# Altium schematic symbol library semubot_lidar_driver_schematics.SchLib: 23 symbols
Pins are listed as number, name and electrical type; pins without a type are passive.

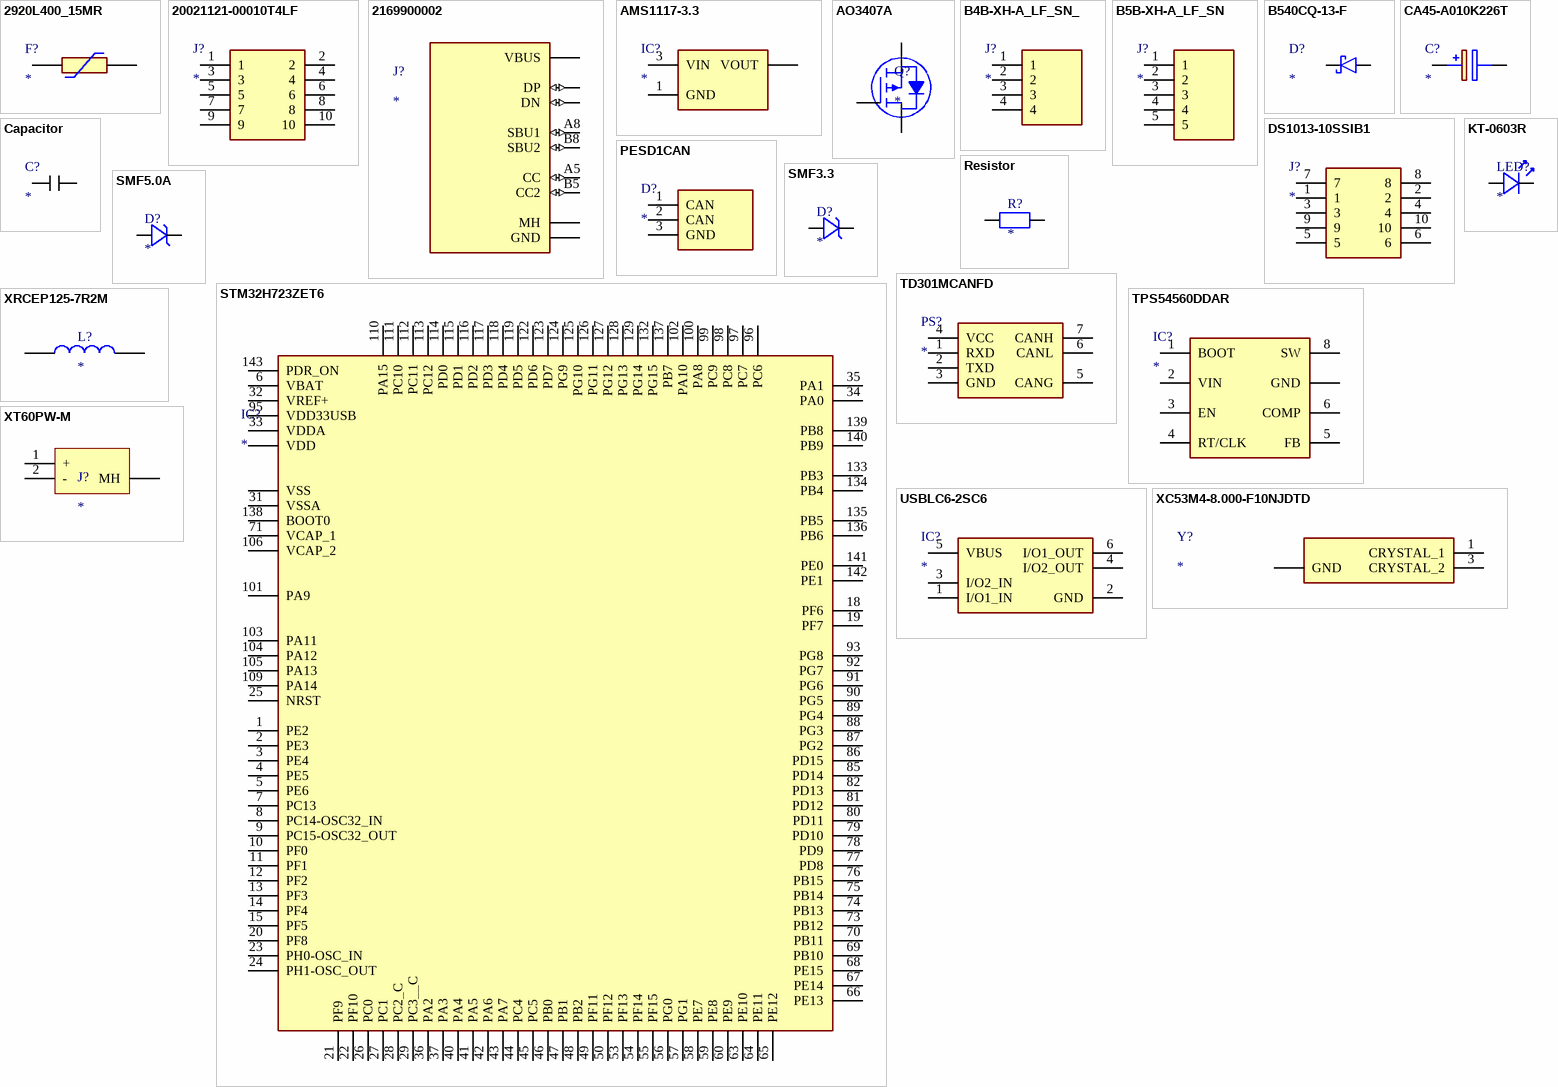
[diagram p0: symbols 2920L400_15MR to XT60PW-M]

## 2920L400_15MR
designator F?
Resettable Fuse; Manufacturer_Name: LITTELFUSE; Manufacturer_Part_Number: 2920L400/15MR; Datasheet Link: http://m.littelfuse.com/~/media/electronics/datasheets/resettable_ptcs/littelfuse_ptc_2920l_datasheet.pdf.pdf; Height: 1.8mm; Mouser Part Number: 576-2920L400/15MR; Mouser Price/Stock: https://www.mouser.co.uk/ProductDetail/Littelfuse/2920L400-15MR?qs=%2FPOkb%252BiDxRVcBFTgv8H%2FIw%3D%3D; Arrow Part Number: 2920L400/15MR; Arrow Price/Stock: https://www.arrow.com/en/products/2920l40015mr/littelfuse?utm_currency=USD&region=nac
footprint 2920L07560MR
pins: 1, 2

## 20021121-00010T4LF
designator J?
Connector; Manufacturer_Name: Amphenol; Manufacturer_Part_Number: 20021121-00010T4LF; Datasheet Link: https://cdn.amphenol-cs.com/media/wysiwyg/files/drawing/20021121.pdf; Height: 4.75mm; Mouser Part Number: 649-221121-00010T4LF; Mouser Price/Stock: https://www.mouser.co.uk/ProductDetail/Amphenol-FCI/20021121-00010T4LF?qs=oJs1R%252BxK6kTva5Su0CuB6g%3D%3D; Supplier 1: Avnet; Supplier Part Number 1: 20021121-00010T4LF; ComponentLink1Description: Datasheet; ComponentLink1URL: https://cdn.amphenol-cs.com/media/wysiwyg/files/drawing/20021121.pdf
footprint 2002112100010T4LF
pins: 1, 2, 3, 4, 5, 6, 7, 8, 9, 10

## 2169900002
designator J?
Connector; Manufacturer_Name: Molex; Manufacturer_Part_Number: 2169900002; Datasheet Link: https://www.molex.com/en-us/products/part-detail-pdf/2169900002?display=pdf; Height: 3.36mm; Arrow Part Number: 2169900002; Arrow Price/Stock: https://www.arrow.com/en/products/2169900002/molex.html?utm_currency=USD&region=nac
footprint 2169900002; pin to pad A1>A1+A12 A4>A4+A9 A6>A6+B6 A7>A7+B7 MH1>MH1+MH2+MH3+MH4
pins: A1 GND, A4 VBUS, A5 CC (io), A6 DP (io), A7 DN (io), A8 SBU1 (io), B5 CC2 (io), B8 SBU2 (io), MH1 MH

## AMS1117-3.3
designator IC?
Integrated Circuit; Manufacturer_Name: Advanced Monolithic Systems; Manufacturer_Part_Number: AMS1117-1.5; Datasheet Link: http://www.advanced-monolithic.com/pdf/ds1117.pdf; Height: 1.8mm
footprint AMS1117-3.3 (C6186)
pins: 1 GND, 3 VIN, 4 VOUT

## AO3407A
designator Q?
MOSFET (P-Channel); Manufacturer_Name: Alpha & Omega Semiconductors; Manufacturer_Part_Number: AO3407A; Height: 1.25mm; Arrow Part Number: AO3401A; Arrow Price/Stock: https://www.arrow.com/en/products/ao3401a/alpha-and-omega-semiconductor.html?utm_currency=USD&region=nac
footprint SOT95P280X125-3N
pins: 1, 2, 3

## B4B-XH-A_LF_SN_
designator J?
Connector; Manufacturer_Name: JST (JAPAN SOLDERLESS TERMINALS); Manufacturer_Part_Number: B4B-XH-A(LF)(SN); Datasheet Link: https://datasheet.lcsc.com/szlcsc/JST-Sales-America-B4B-XH-A-LF-SN_C144395.pdf; Height: 7mm; Mouser Part Number: 306-B4BXHALFSN; Mouser Price/Stock: https://www.mouser.co.uk/ProductDetail/JST-Commercial/B4B-XH-ALFSN?qs=cdbOS8ANM9CfC08d%252BywhFw%3D%3D; Arrow Part Number: B4B-XH-A(LF)(SN); Arrow Price/Stock: https://www.arrow.com/en/products/b4b-xh-a-lf-sn/jst-manufacturing.html?utm_currency=USD&region=europe
footprint B4BXHALFSN
pins: 1, 2, 3, 4

## B5B-XH-A_LF_SN
designator J?
Connector; Manufacturer_Name: JST (JAPAN SOLDERLESS TERMINALS); Manufacturer_Part_Number: B5B-XH-A(LF)(SN); Datasheet Link: http://www.jst-mfg.com/product/pdf/eng/eXH.pdf; Height: 7mm; Mouser Part Number: N/A; Mouser Price/Stock: https://www.mouser.co.uk/ProductDetail/JST-Commercial/B5B-XH-ALFSN?qs=IKkN%2F947nfBtEhlRye3uAw%3D%3D; Arrow Part Number: B5B-XH-A(LF)(SN); Arrow Price/Stock: https://www.arrow.com/en/products/b5b-xh-a-lf-sn/jst-manufacturing.html?utm_currency=USD&region=europe
footprint B5B-XH-A(LF)(SN)
pins: 1, 2, 3, 4, 5

## B540CQ-13-F
designator D?
Schottky Diode; Manufacturer_Name: Diodes Incorporated; Manufacturer_Part_Number: B540CQ-13-F; Datasheet Link: https://www.diodes.com/assets/Datasheets/ds13012.pdf; Height: 2.5mm; Mouser Part Number: 621-B540CQ-13-F; Mouser Price/Stock: https://www.mouser.co.uk/ProductDetail/Diodes-Incorporated/B540CQ-13-F?qs=BvpHGKeVh3rbtYAYW%2FUwCw%3D%3D; Arrow Part Number: B540CQ-13-F; Arrow Price/Stock: https://www.arrow.com/en/products/b540cq-13-f/diodes-incorporated?utm_currency=USD&region=europe
footprint B540CQ-13-F
pins: 1 K, 2 A

## CA45-A010K226T
designator C?
Capacitor Polarised C122643; Manufacturer_Name: Hunan Xiangyee in S&T; Manufacturer_Part_Number: CA45-A010K226T; Datasheet Link: https://datasheet.lcsc.com/szlcsc/1811261831_Hunan-Xiangyee-in-S-T-CA45-A010K226T_C122643.pdf; Height: 1.8mm
footprint CAPPM3216X180N
pins: 1 +, 2 -

## Capacitor
designator C?
Capacitor; Capacitance: *
footprint 0603Capacitor
footprint 0805Capacitor
footprint 1206CAPACITOR
pins: 1, 2

## DS1013-10SSIB1
designator J?
Connector; Manufacturer_Name: Connfly; Manufacturer_Part_Number: DS1013-10SSIB1; Datasheet Link: https://www.tme.com/Document/27ec11f62a6bc702dcb7110a541f177d/DS1013.pdf; Height: 9.55mm
footprint DS101310SSIB1
pins: 1, 2, 3, 4, 5, 6, 7, 8, 9, 10

## KT-0603R
designator LED?
LED; Manufacturer_Name: Hubei KENTO Elec; Manufacturer_Part_Number: KT-0603R; Datasheet Link: https://datasheet.lcsc.com/szlcsc/Hubei-KENTO-Elec-KT-0603R_C2286.pdf; Height: 0.7mm
footprint LEDC1608X70N
pins: 1, 2

## PESD1CAN
designator D?
TVS Diode (Bi-directional); Manufacturer_Name: NXP; Manufacturer_Part_Number: PESD1CAN; Datasheet Link: https://datasheet.preprod.pas.partquest.com/images/VipMasterIC/IC/PHGL/PHGLS15341/PHGLS15341-1.pdf?hkey=61A2E4C270F0397D049F8F05BD4F1054; Height: 1.1mm; Mouser Part Number: N/A; Mouser Price/Stock: https://www.mouser.co.uk/ProductDetail/NXP-Semiconductors/PESD1CAN?qs=55YtniHzbhBnD7lYYuVpRQ%3D%3D
footprint SOT95P230X110-3N
pins: 1 CAN, 2 CAN, 3 GND

## Resistor
designator R?
SMD Resistor; Resistance: *
footprint 0603Resistor
pins: 1 0, 2 0

## SMF3.3
designator D?
TVS DIODE 3V3; ComponentLink1Description: Datasheet; ComponentLink1URL: https://www.littelfuse.com/assetdocs/tvs-diodes-smf3-3-datasheet?assetguid=2E80CD26-B0C3-442F-9D77-27A283CCFF4F
footprint SMF3.3 (TVS DIODE 3V3)
pins: 1, 2

## SMF5.0A
designator D?
TVS diode; Supplier 1: Mouser; Supplier Part Number 1: SMF5.0A; ComponentLink1Description: Datasheet; ComponentLink1URL: https://www.littelfuse.com/assetdocs/tvs-diodes-smf-datasheet?assetguid=7EB8A5B6-BDD0-4561-8F19-0C3CC6F9B2AF
footprint SMF5.0A
pins: 1, 2

## STM32H723ZET6
designator IC?
Integrated Circuit; Manufacturer_Name: STMicroelectronics; Manufacturer_Part_Number: STM32H723ZET6; Datasheet Link: https://www.st.com/resource/en/datasheet/stm32h723zg.pdf; Height: 1.6mm; Mouser Part Number: 511-STM32H723ZET6; Mouser Price/Stock: https://www.mouser.co.uk/ProductDetail/STMicroelectronics/STM32H723ZET6?qs=sPbYRqrBIVnvdSB0MwAafg%3D%3D; Arrow Part Number: STM32H723ZET6; Arrow Price/Stock: https://www.arrow.com/en/products/stm32h723zet6/stmicroelectronics?utm_currency=USD&region=nac
footprint STM32H723ZET6; pin to pad 16>16+38+51+61+83+94+107+120+130 17>17+30+39+52+62+72+84+108+121+131+144
pins: 1 PE2, 2 PE3, 3 PE4, 4 PE5, 5 PE6, 6 VBAT, 7 PC13, 8 PC14-OSC32_IN, 9 PC15-OSC32_OUT, 10 PF0, 11 PF1, 12 PF2, 13 PF3, 14 PF4, 15 PF5, 16 VSS, 17 VDD, 18 PF6, 19 PF7, 20 PF8, 21 PF9, 22 PF10, 23 PH0-OSC_IN, 24 PH1-OSC_OUT, 25 NRST, 26 PC0, 27 PC1, 28 PC2_C, 29 PC3__C, 31 VSSA, 32 VREF+, 33 VDDA, 34 PA0, 35 PA1, 36 PA2, 37 PA3, 40 PA4, 41 PA5, 42 PA6, 43 PA7, 44 PC4, 45 PC5, 46 PB0, 47 PB1, 48 PB2, 49 PF11, 50 PF12, 53 PF13, 54 PF14, 55 PF15, 56 PG0, 57 PG1, 58 PE7, 59 PE8, 60 PE9, 63 PE10, 64 PE11, 65 PE12, 66 PE13, 67 PE14, 68 PE15, 69 PB10, 70 PB11, 71 VCAP_1, 73 PB12, 74 PB13, 75 PB14, 76 PB15, 77 PD8, 78 PD9, 79 PD10, 80 PD11, 81 PD12, 82 PD13, 85 PD14, 86 PD15, 87 PG2, 88 PG3, 89 PG4, 90 PG5, 91 PG6, 92 PG7, 93 PG8, 95 VDD33USB, 96 PC6, 97 PC7, 98 PC8, 99 PC9, 100 PA8, 101 PA9, 102 PA10, 103 PA11, 104 PA12, 105 PA13, 106 VCAP_2, 109 PA14, 110 PA15, 111 PC10, 112 PC11, 113 PC12, 114 PD0, 115 PD1, 116 PD2, 117 PD3, 118 PD4, 119 PD5, 122 PD6, 123 PD7, 124 PG9, 125 PG10, 126 PG11, 127 PG12, 128 PG13, 129 PG14, 132 PG15, 133 PB3, 134 PB4, 135 PB5, 136 PB6, 137 PB7, 138 BOOT0, 139 PB8, 140 PB9, 141 PE0, 142 PE1, 143 PDR_ON

## TD301MCANFD
designator PS?
Power Supply; Manufacturer_Name: Mornsun Power; Manufacturer_Part_Number: TD301MCANFD; Datasheet Link: https://www.mornsun-power.com/public/uploads/pdf/TD5(3)01MCANFD.pdf; Height: 8.45mm
footprint TD301MCANFD
pins: 1 RXD, 2 TXD, 3 GND, 4 VCC, 5 CANG, 6 CANL, 7 CANH

## TPS54560DDAR
designator IC?
Integrated Circuit; Manufacturer_Name: Texas Instruments; Manufacturer_Part_Number: TPS54560DDAR; Datasheet Link: http://www.ti.com/lit/ds/symlink/tps54560.pdf; Height: 1.7mm; Mouser Part Number: 595-TPS54560DDAR; Mouser Price/Stock: https://www.mouser.co.uk/ProductDetail/Texas-Instruments/TPS54560DDAR?qs=%2FA2SZCkL4Tlm1gC5t8ZNIg%3D%3D; Arrow Part Number: TPS54560DDAR; Arrow Price/Stock: https://www.arrow.com/en/products/tps54560ddar/texas-instruments?region=nac
footprint TPS54560DDAR; pin to pad 7>7+9
pins: 1 BOOT, 2 VIN, 3 EN, 4 RT/CLK, 5 FB, 6 COMP, 7 GND, 8 SW

## USBLC6-2SC6
designator IC?
Integrated Circuit; Manufacturer_Name: STMicroelectronics; Manufacturer_Part_Number: USBLC6-2SC6; Datasheet Link: https://www.st.com/resource/en/datasheet/usblc6-2.pdf; Height: 1.45mm; Mouser Part Number: 511-USBLC6-2SC6; Mouser Price/Stock: https://www.mouser.co.uk/ProductDetail/STMicroelectronics/USBLC6-2SC6?qs=po45yt2pPpu%2FhNIlwQdTlg%3D%3D; Arrow Part Number: USBLC6-2SC6; Arrow Price/Stock: https://www.arrow.com/en/products/usblc6-2sc6/stmicroelectronics.html?utm_currency=USD&region=nac
footprint USBLC6-2SC6
pins: 1 I/O1_IN, 2 GND, 3 I/O2_IN, 4 I/O2_OUT, 5 VBUS, 6 I/O1_OUT

## XC53M4-8.000-F10NJDTD
designator Y?
Crystal or Oscillator; Manufacturer_Name: Hang Crystal International; Manufacturer_Part_Number: XC53M4-8.000-F10NJDTD; Datasheet Link: https://atlas.eefcdn.com/partdatasheet/666696/666696_94707471_1757293827116.pdf; Height: 0.8mm
footprint XC53M48000F10NJDTD; pin to pad 4>4+2
pins: 1 CRYSTAL_1, 3 CRYSTAL_2, 4 GND

## XRCEP125-7R2M
designator L?
footprint XRCEP125-7R2M
pins: 1, 2

## XT60PW-M
designator J?
Connector: DC supply; socket; male; power supply; XT60; 30A; 500V; ComponentLink1Description: Datasheet; ComponentLink1URL: https://www.tme.eu/Document/b13629717d44ae038681dba08d18c0b6/XT60PW-M.pdf
footprint XT60PW-M; pin to pad 3>MH1+MH2
pins: 1 +, 2 -, 3 MH